# Altium footprint library Passive-Cap.PcbLib: 70 footprints (part 1 of 5)
Each footprint in its own frame and in the unit in brackets; x right, y up, seen from the top. Pads: shape width x height; smd on the part's side, far side on the other; paste and mask are expansions set on the pad; w line width, h text height; cw(c..) or ccw(c..) is an arc to the next point about the centre after c.
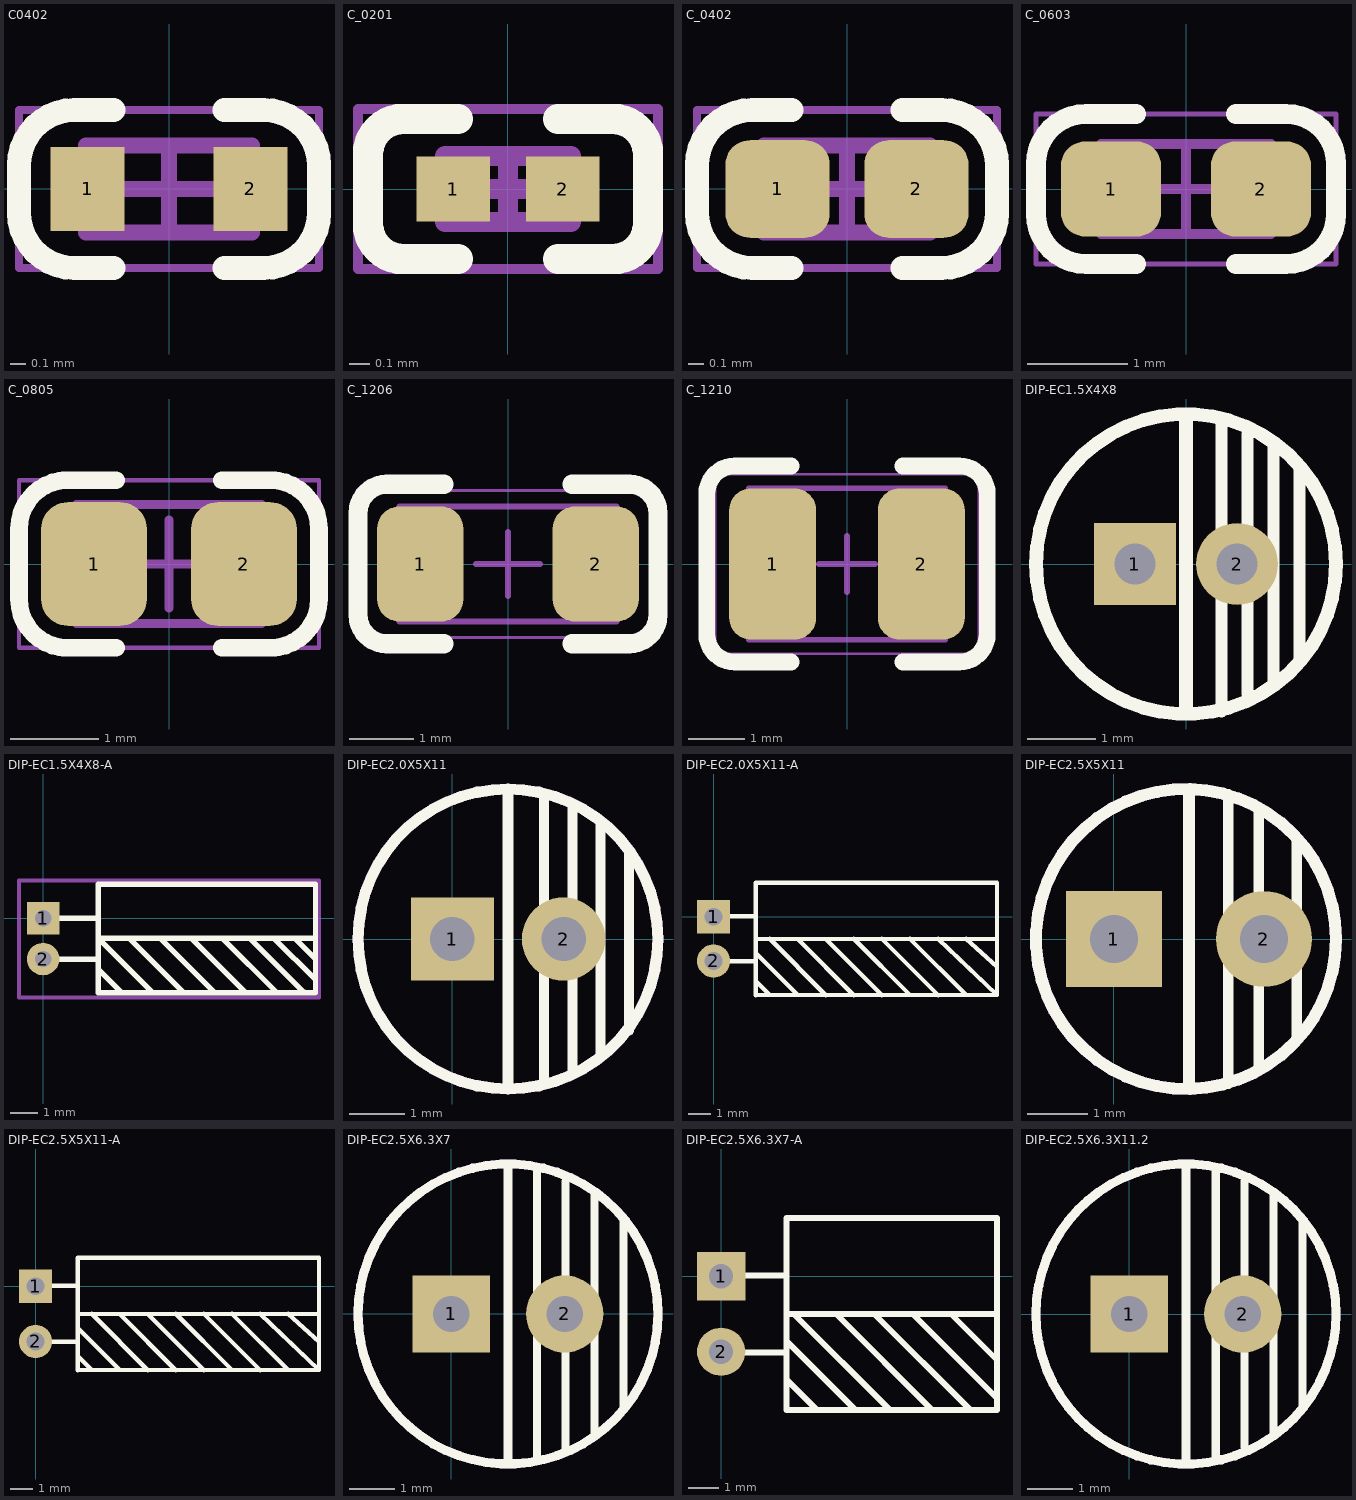
[diagram p0: the footprints below, top view; thin cyan lines are the x and y axes]

## C0402 [mil]
pads (2):
  rect 18.5x20.9 smd: 1(-20.3,0) 2(20.3,0)
Top Overlay:
  lines w5.98: -13.78,-19.68 -23.62,-19.68 cw(c-23.62,-5.91) -37.4,-5.91 -37.4,5.91 cw(c-23.62,5.91) -23.62,19.69 -13.78,19.68 ; 13.78,-19.68 23.62,-19.68 ccw(c23.62,-5.91) 37.4,-5.91 37.4,5.91 ccw(c23.62,5.91) 23.62,19.69 13.78,19.68
Top Value:
  text "'.Comment'" at -51.02,-7.05 h23.62
Top Designator:
  text "'.Designator'" at -89.92,-6.58 h31.5
Top Courtyard:
  lines w1.97: -37.4,-19.69 -37.4,19.68 37.4,19.68 37.4,-19.69 -37.4,-19.69
  lines w3.94: -10.83,0 10.83,0 ; 0,-10.83 0,10.83
Top Assembly:
  lines w3.94: -20.67,-10.83 -20.67,10.83 20.67,10.83 20.67,-10.83 -20.67,-10.83
3D body "CAPC-0402-T0.55-BN.stp": height 21.65, standoff 0, extent -20.66,-10.82 20.68,10.83

## C_0201 [mm] "Chip Capacitor, 2-Leads, Body 0.60x0.30mm, IPC Medium Density"
height 0.3
pads (2):
  rect 0.368x0.324 smd: 1(-0.274,0) 2(0.274,0)
Top Overlay:
  lines w0.152: -0.25,-0.35 -0.525,-0.35 cw(c-0.525,-0.175) -0.7,-0.175 -0.7,0.175 cw(c-0.525,0.175) -0.525,0.35 -0.25,0.35 ; 0.25,-0.35 0.525,-0.35 ccw(c0.525,-0.175) 0.7,-0.175 0.7,0.175 ccw(c0.525,0.175) 0.525,0.35 0.25,0.35
Top Value:
  text "'.Comment'" at -1.296,-0.179 h0.6
Top Designator:
  text "'.Designator'" at -2.284,-0.167 h0.8
Top Courtyard:
  lines w0.05: -0.75,-0.4 -0.75,0.4 0.75,0.4 0.75,-0.4 -0.75,-0.4
  lines w0.1: -0.165,0 0.165,0 ; 0,-0.165 0,0.165
Top Assembly:
  lines w0.1: -0.315,-0.165 -0.315,0.165 0.315,0.165 0.315,-0.165 -0.315,-0.165
3D body "0201C.STEP": height 0.31, standoff 0, extent -0.3,-0.152 0.31,0.153

## C_0402 [mm] "Chip Capacitor, 2-Leads, Body 1.00x0.50mm, IPC Medium Density"
height 0.55
pads (2):
  rrect50% 0.66x0.62 smd: 1(-0.44,0) 2(0.44,0)
Top Overlay:
  lines w0.152: -0.35,-0.5 -0.6,-0.5 cw(c-0.6,-0.15) -0.95,-0.15 -0.95,0.15 cw(c-0.6,0.15) -0.6,0.5 -0.35,0.5 ; 0.35,-0.5 0.6,-0.5 ccw(c0.6,-0.15) 0.95,-0.15 0.95,0.15 ccw(c0.6,0.15) 0.6,0.5 0.35,0.5
Top Value:
  text "'.Comment'" at -1.296,-0.179 h0.6
Top Designator:
  text "'.Designator'" at -2.284,-0.167 h0.8
Top Courtyard:
  lines w0.05: -0.95,-0.5 0.95,-0.5 0.95,0.5 -0.95,0.5 -0.95,-0.5
  lines w0.1: -0.275,0 0.275,0 ; 0,-0.275 0,0.275
Top Assembly:
  lines w0.1: -0.525,-0.275 0.525,-0.275 0.525,0.275 -0.525,0.275 -0.525,-0.275
3D body "CAPC-0402-T0.55-BN.stp": height 0.55, standoff 0, extent -0.525,-0.275 0.525,0.275

## C_0603 [mm] "Chip Capacitor, 2-Leads, Body 1.60x0.80mm, IPC Medium Density"
height 0.8
pads (2):
  rrect50% 1x0.95 smd: 1(-0.75,0) 2(0.75,0)
Top Overlay:
  lines w0.2: -0.5,-0.75 -1,-0.75 cw(c-1,-0.25) -1.5,-0.25 -1.5,0.25 ; -0.5,0.75 -1,0.75 ccw(c-1,0.25) -1.5,0.25 ; 0.5,-0.75 1,-0.75 ccw(c1,-0.25) 1.5,-0.25 1.5,0.25 ccw(c1,0.25) 1,0.75 0.5,0.75 ; -1.5,0.25 -1.5,0.25
Top Value:
  text "'.Comment'" at -1.317,-0.27 h1
Top Designator:
  text "'.Designator'" at -2.86,-0.209 h1
Top Courtyard:
  lines w0.05: -1.5,-0.75 1.5,-0.75 1.5,0.75 -1.5,0.75 -1.5,-0.75
  lines w0.1: -0.45,0 0.45,0 ; 0,-0.45 0,0.45
Top Assembly:
  lines w0.1: -0.85,-0.45 0.85,-0.45 0.85,0.45 -0.85,0.45 -0.85,-0.45
3D body "C0603C100C3GACTU.stp": height 0.87, standoff 0, extent -0.8,-0.4 0.8,0.4

## C_0805 [mm] "Chip Capacitor, 2-Leads, Body 2.00x1.25mm, IPC Medium Density"
height 1.25
pads (2):
  rrect50% 1.2x1.4 smd: 1(-0.85,0) 2(0.85,0)
Top Overlay:
  lines w0.2: -1.2,-0.95 -0.6,-0.95 ; -1.2,0.95 -0.6,0.95 ; -1.15,-0.95 cw(c-1.15,-0.4) -1.7,-0.4 -1.7,0.4 cw(c-1.15,0.4) -1.15,0.95 ; 0.6,-0.95 1.2,-0.95 ; 0.6,0.95 1.2,0.95 ; 1.15,-0.95 ccw(c1.15,-0.4) 1.7,-0.4 1.7,0.4 ccw(c1.15,0.4) 1.15,0.95
Top Value:
  text "'.Comment'" at -1.843,-0.378 h1.4
Top Designator:
  text "'.Designator'" at -4.579,-0.335 h1.6
Top Courtyard:
  lines w0.05: -1.7,-0.95 1.7,-0.95 1.7,0.95 -1.7,0.95 -1.7,-0.95
  lines w0.1: -0.5,0 0.5,0 ; 0,-0.5 0,0.5
Top Assembly:
  lines w0.1: -1.05,-0.675 1.05,-0.675 1.05,0.675 -1.05,0.675 -1.05,-0.675
3D body "C0805C100J5GACTU.stp": height 0.88, standoff 0, extent -1,-0.625 1,0.625

## C_1206 [mm] "Chip Capacitor, 2-Leads, Body 3.20x1.60mm, IPC Medium Density"
height 1.25
pads (2):
  rrect50% 1.35x1.8 smd: 1(-1.375,0) 2(1.375,0)
Top Overlay:
  lines w0.3: -1,-1.25 -1.9,-1.25 cw(c-1.9,-0.8) -2.35,-0.8 -2.35,0.8 cw(c-1.9,0.8) -1.9,1.25 -1,1.25 ; 1,-1.25 1.9,-1.25 ccw(c1.9,-0.8) 2.35,-0.8 2.35,0.8 ccw(c1.9,0.8) 1.9,1.25 1,1.25
Top Value:
  text "'.Comment'" at -2.634,-0.54 h2
Top Designator:
  text "'.Designator'" at -6.297,-0.461 h2.2
Top Courtyard:
  lines w0.05: -2.3,-1.15 -2.3,1.15 2.3,1.15 2.3,-1.15 -2.3,-1.15
  lines w0.1: -0.5,0 0.5,0 ; 0,-0.5 0,0.5
Top Assembly:
  lines w0.1: -1.7,-0.9 -1.7,0.9 1.7,0.9 1.7,-0.9 -1.7,-0.9
3D body "CL31B106KAHNNNE.stp": height 1.8, standoff 0, extent -1.6,-0.8 1.6,0.8

## C_1210 [mm] "Chip Capacitor, 2-Leads, Body 3.20x2.50mm, IPC Medium Density"
height 1.8
pads (2):
  rrect50% 1.55x2.7 smd: 1(-1.325,0) 2(1.325,0)
Top Overlay:
  lines w0.3: -1,-1.75 -2,-1.75 cw(c-2,-1.25) -2.5,-1.25 -2.5,1.25 cw(c-2,1.25) -2,1.75 -1,1.75 ; 1,-1.75 2,-1.75 ccw(c2,-1.25) 2.5,-1.25 2.5,1.25 ccw(c2,1.25) 2,1.75 1,1.75
Top Value:
  text "'.Comment'" at -2.634,-0.54 h2
Top Designator:
  text "'.Designator'" at -6.297,-0.461 h2.2
Top Courtyard:
  lines w0.05: -2.35,-1.6 2.35,-1.6 2.35,1.6 -2.35,1.6 -2.35,-1.6
  lines w0.1: -0.5,0 0.5,0 ; 0,-0.5 0,0.5
Top Assembly:
  lines w0.1: -1.75,-1.35 1.75,-1.35 1.75,1.35 -1.75,1.35 -1.75,-1.35
3D body "GRM32ER61C476KE15L.stp": height 2.7, standoff 0, extent -1.6,-1.25 1.6,1.25

## DIP-EC1.5X4X8 [mm]
pads (2):
  rect 1.2x1.2 hole 0.6: 1(-0.75,0)
  round 1.2 hole 0.6: 2(0.75,0)
Top Overlay:
  circle w0.2: c0,0 r2.2
  lines w0.178: 0.52,-2.159 0.52,2.032 ; 0.901,-1.905 0.901,1.905 ; 1.282,-1.778 1.282,1.778 ; 1.663,-1.397 1.663,1.397
  lines w0.2: 0,-2.159 0,-2 0,2.159
Bottom Courtyard:
  circle w0.102: c0,0 r2.2
  text ".Designator" at 7.618,-0.508 h1.52
3D body "CAP 1.5X4X8.STEP": height 8.04, standoff -3.46, extent -2.01,-1.966 2.01,2.032

## DIP-EC1.5X4X8-A [mm]
pads (2):
  rect 1.2x1.2 hole 0.6: 1(0,0)
  round 1.2 hole 0.6: 2(0,-1.5)
Top Overlay:
  lines w0.2: 0,-1.5 2,-1.5 ; 0,0 2,0 ; 2.032,-1.881 2.889,-2.738 2.921,-2.738 ; 2.921,-1.627 2.032,-0.738 ; 3.175,-0.738 5.175,-2.738 5.207,-2.738 ; 4.064,-2.738 4.032,-2.738 2.032,-0.738 ; 4.318,-0.738 6.318,-2.738 6.35,-2.738 ; 5.461,-0.738 7.461,-2.738 7.493,-2.738 ; 6.604,-0.738 8.604,-2.738 8.636,-2.738 ; 7.62,-0.738 9.597,-2.715 ccw(c9.652,-2.661) 9.652,-2.738 ; 8.509,-0.738 10.031,-2.26 cw(c10.03,-2.262) 10.032,-2.262 ; 9.271,-0.738 10.031,-1.498 cw(c10.03,-1.5) 10.032,-1.5 ; 10.032,-0.738 2.032,-0.738 ; 2.032,-2.738 2.032,1.262 10.032,1.262 10.032,-2.738 2.032,-2.738
Bottom Courtyard:
  lines w0.152: -0.889,-2.921 10.16,-2.921 10.16,1.397 -0.889,1.397 -0.889,-2.921
  text ".Designator" at 12.253,-1.27 h1.52
3D body "CAP 1.5X4X8-H.STEP": height 4.02, standoff -3.48, extent -0.254,-2.772 9.996,1.248

## DIP-EC2.0X5X11 [mm]
pads (2):
  rect 1.5x1.5 hole 0.8: 1(0,0)
  round 1.5 hole 0.8: 2(2,0)
Top Overlay:
  circle w0.2: c1,0 r2.7
  lines w0.178: 1.651,-2.54 1.651,2.54 ; 2.159,-2.413 2.159,2.413 ; 2.667,-2.032 2.667,2.032 ; 3.175,-1.651 3.175,1.524
  lines w0.2: 1,-2.667 1,-2 1,2.667
Bottom Courtyard:
  circle w0.2: c1,0 r2.7
  text ".Designator" at 8.618,-0.508 h1.52
3D body "CAP 2.0X5X11.STEP": height 11.04, standoff -3.42, extent -1.524,-2.5 3.486,2.5

## DIP-EC2.0X5X11-A [mm]
pads (2):
  rect 1.5x1.5 hole 0.8: 1(0,0)
  round 1.5 hole 0.8: 2(0,-2)
Top Overlay:
  lines w0.2: 0.762,-2.016 1.905,-2.016 ; 0.762,0.016 1.905,0.016 ; 1.905,-2.905 2.54,-3.54 ; 1.905,-1.635 3.81,-3.54 ; 1.905,-1.006 12.827,-1 ; 2.54,-1 5.08,-3.548 ; 3.81,-1.005 6.35,-3.547 ; 5.08,-1.004 7.62,-3.545 ; 6.35,-1 8.89,-3.54 ; 7.62,-1.003 10.16,-3.543 ; 8.89,-1.002 11.43,-3.541 ; 10.16,-1.001 12.827,-3.54 ; 11.43,-1.001 12.827,-2.27 ; 12.827,-3.54 1.905,-3.552 1.905,1.54 12.827,1.54 12.827,-3.54
Bottom Courtyard:
  text ".Designator" at 13.67,-1.514 h1.52
3D body "CAP 2.0X5X11-H.STEP": height 5.02, standoff -3.48, extent -0.254,-3.521 12.956,1.489

## DIP-EC2.5X5X11 [mm]
pads (2):
  rect 1.6x1.6 hole 0.8: 1(0,0)
  round 1.6 hole 0.8: 2(2.5,0)
Top Overlay:
  circle w0.2: c1.2,0 r2.5
  lines w0.178: 1.905,-2.413 1.905,2.413 ; 2.413,-2.159 2.413,2.159 ; 3.048,-1.651 3.048,1.651
  lines w0.2: 1.25,-2.489 1.25,2.413
Bottom Courtyard:
  circle w0.2: c1.2,0 r2.5
  text ".Designator" at 8.818,-0.508 h1.52
3D body "CAP 2.5X5X11.STEP": height 11.03, standoff -3.43, extent -1.255,-2.586 3.755,2.413

## DIP-EC2.5X5X11-A [mm]
pads (2):
  rect 1.5x1.5 hole 0.8: 1(0,0)
  round 1.5 hole 0.8: 2(0,-2.5)
Top Overlay:
  lines w0.2: 0.762,-2.516 1.905,-2.516 ; 0.762,0.016 1.905,0.016 ; 1.905,-3.155 2.54,-3.79 ; 1.905,-1.885 3.81,-3.79 ; 1.905,-1.256 12.827,-1.25 ; 2.54,-1.25 5.08,-3.798 ; 3.81,-1.255 6.35,-3.797 ; 5.08,-1.254 7.62,-3.795 ; 6.35,-1.25 8.89,-3.79 ; 7.62,-1.253 10.16,-3.793 ; 8.89,-1.252 11.43,-3.791 ; 10.16,-1.251 12.827,-3.79 ; 11.43,-1.251 12.827,-2.52 ; 12.827,-3.79 1.905,-3.802 1.905,1.29 12.827,1.29 12.827,-3.79
Bottom Courtyard:
  text ".Designator" at 13.669,-1.764 h1.52
3D body "CAP 2.5X5X11-H.STEP": height 5.02, standoff -3.48, extent -0.255,-3.74 12.955,1.27

## DIP-EC2.5X6.3X7 [mm]
pads (2):
  rect 1.7x1.7 hole 0.8: 1(0,0)
  round 1.7 hole 0.8: 2(2.5,0)
Top Overlay:
  circle w0.2: c1.25,0 r3.3
  lines w0.178: 1.885,-3.175 1.885,3.175 ; 2.52,-3.048 2.52,2.921 ; 3.155,-2.667 3.155,2.667 ; 3.79,-2.032 3.79,2.032
  lines w0.2: 1.25,-3.302 1.25,3.251
Bottom Courtyard:
  circle w0.2: c1.25,0 r3.3
  text ".Designator" at 8.868,-0.509 h1.52
3D body "CAP 2.5X6.3X7.STEP": height 7.03, standoff -3.38, extent -2.032,-3.149 4.278,3.149

## DIP-EC2.5X6.3X7-A [mm]
pads (2):
  rect 1.6x1.6 hole 0.8: 1(0,0)
  round 1.6 hole 0.8: 2(0,-2.5)
Top Overlay:
  lines w0.2: 0.762,-2.52 2.159,-2.52 ; 0.762,0.02 2.159,0.02 ; 2.159,-3.409 3.175,-4.425 ; 2.159,-2.139 4.445,-4.425 ; 2.159,-1.25 9.144,-1.25 ; 2.413,-1.25 5.588,-4.425 5.715,-4.425 ; 3.81,-1.25 6.985,-4.425 ; 5.08,-1.25 8.255,-4.425 ; 6.35,-1.25 9.144,-4.044 ; 7.62,-1.25 9.144,-2.774 ; 2.159,-4.425 9.144,-4.425 9.144,1.925 2.159,1.925 2.159,-4.425
Bottom Courtyard:
  text ".Designator" at 11.789,-1.758 h1.52
3D body "CAP 2.5X6.3X7-H.STEP": height 6.32, standoff -3.48, extent -0.287,-4.385 8.923,1.925

## DIP-EC2.5X6.3X11.2 [mm]
pads (2):
  rect 1.7x1.7 hole 0.8: 1(0,0)
  round 1.7 hole 0.8: 2(2.5,0)
Top Overlay:
  circle w0.2: c1.25,0 r3.3
  lines w0.178: 1.905,-3.175 1.905,3.175 ; 2.54,-2.921 2.54,2.921 ; 3.175,-2.667 3.175,2.667 ; 3.81,-2.032 3.81,2.032
  lines w0.2: 1.25,-3.226 1.25,3.277
Bottom Courtyard:
  circle w0.2: c1.25,0 r3.3
  text ".Designator" at 8.868,-0.508 h1.52
3D body "CAP 2.5X6.3X11.2.STEP": height 11.23, standoff -3.38, extent -1.905,-3.15 4.405,3.15